# Altium schematic symbol library STTH212U.SchLib: 1 symbol
Pins are listed as number, name and electrical type; pins without a type are passive.

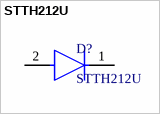
[diagram p0: symbol STTH212U]

## STTH212U
designator D?
DIODE GEN PURP 1.2KV 2A SMB
footprint FP-SMB-MFG
pins: 1 K, 2 A